# Altium footprint library AudioMoth 1.1.PCBLIB: 193 footprints (part 9 of 13)
Each footprint in its own frame and in the unit in brackets; x right, y up, seen from the top. Pads: shape width x height; smd on the part's side, far side on the other; paste and mask are expansions set on the pad; w line width, h text height; cw(c..) or ccw(c..) is an arc to the next point about the centre after c.
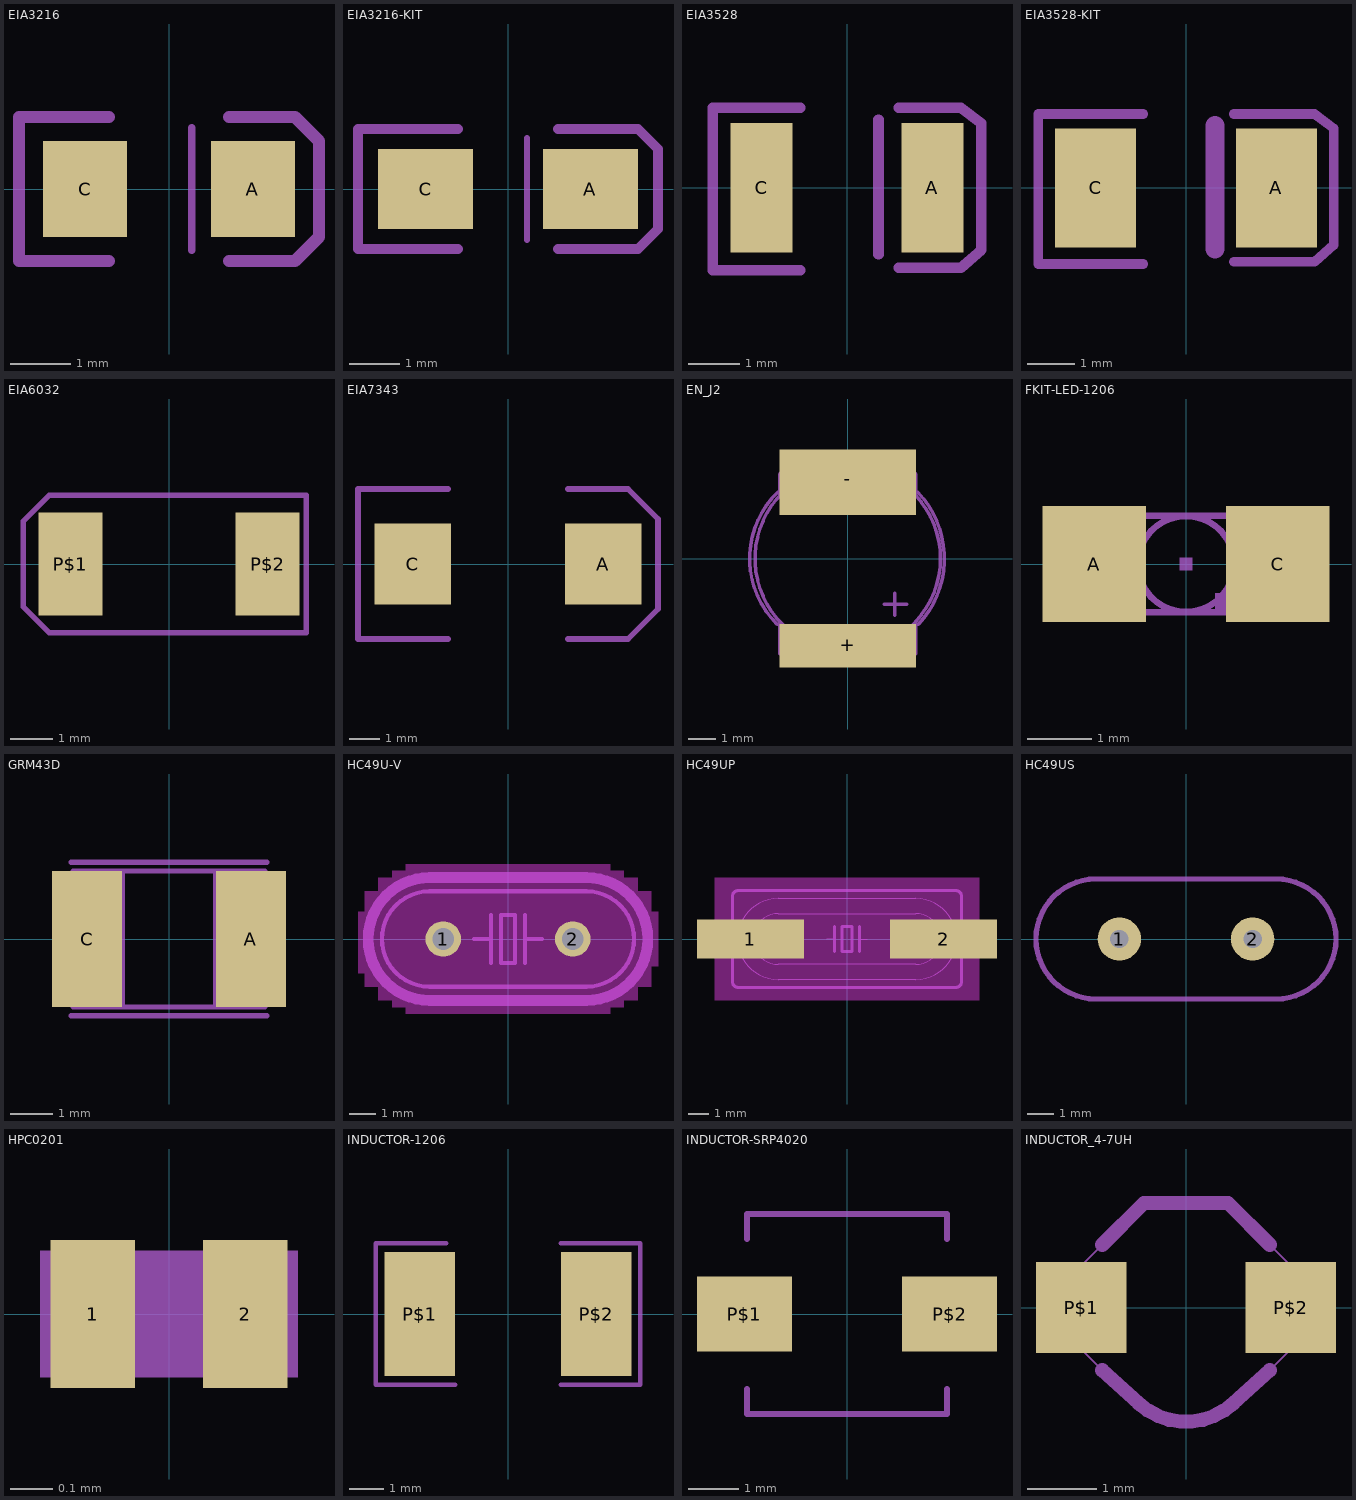
[diagram p8: the footprints below, top view; thin cyan lines are the x and y axes]

## EIA3216 [mm]
pads (2):
  rect 1.4x1.6 smd: A(1.4,0) C(-1.4,0)
tPlace:
  lines w0.127: 0.381,-1.016 0.381,1.016
  lines w0.203: -1,-1.2 -2.5,-1.2 -2.5,1.2 -1,1.2 ; 1,-1.2 2.1,-1.2 2.5,-0.8 2.5,0.8 2.1,1.2 1,1.2

## EIA3216-KIT [mm]
pads (2):
  rect 1.9x1.6 smd: A(1.65,0) C(-1.65,0)
tPlace:
  lines w0.127: 0.381,-1.016 0.381,1.016
  lines w0.203: -1,-1.2 -3,-1.2 -3,1.2 -1,1.2 ; 1,-1.2 2.6,-1.2 3,-0.8 3,0.8 2.6,1.2 1,1.2

## EIA3528 [mm]
pads (2):
  rect 1.2x2.5 smd: A(1.65,0) C(-1.65,0)
tPlace:
  lines w0.203: -0.9,-1.6 -2.6,-1.6 -2.6,1.55 -0.9,1.55 ; 0.609,-1.286 0.609,1.311 ; 1,-1.55 2.2,-1.55 2.6,-1.2 2.6,1.25 2.2,1.55 1,1.55

## EIA3528-KIT [mm]
pads (2):
  rect 1.7x2.5 smd: A(1.9,0) C(-1.9,0)
tPlace:
  lines w0.203: -0.9,-1.6 -3.1,-1.6 -3.1,1.55 -0.9,1.55 ; 1,-1.55 2.7,-1.55 3.1,-1.2 3.1,1.25 2.7,1.55 1,1.55
  lines w0.4: 0.609,-1.286 0.609,1.311

## EIA6032 [mm]
pads (2):
  rect 1.5x2.4 smd: P$1(-2.3,0) P$2(2.3,0)
tPlace:
  lines w0.127: -3.4,-1 -3.4,1 -2.8,1.6 3.2,1.6 3.2,-1.6 -2.8,-1.6 -3.4,-1

## EIA7343 [mm]
pads (2):
  rect 2.55x2.7 smd: A(3.17,0) C(-3.17,0)
tPlace:
  lines w0.203: -2,-2.5 -5,-2.5 -5,2.5 -2,2.5 ; 2,-2.5 4,-2.5 5,-1.5 5,1.5 4,2.5 2,2.5

## EN_J2 [mm]
pads (2):
  rect 5x1.6 smd: +(0,-3.2)
  rect 5x2.4 smd: -(0,2.8)
tDocu:
  circle w0.127: c0,0 r3.4
  lines w0.127: -2.5,-2.3 -2.5,-3.5 2.5,-3.5 2.5,-2.3 ; -2.5,2.3 -2.5,3.1 -2.1,3.5 2.1,3.5 2.5,3.1 2.5,2.3
tPlace:
  lines w0.127: -2.591,-2.413 cw(c-0.203,0) -2.565,2.438 ; 1.346,-1.676 2.159,-1.676 ; 1.727,-2.083 1.727,-1.27 ; 2.565,2.438 cw(c0.013,-0.001) 2.591,-2.413

## FKIT-LED-1206 [mm]
pads (2):
  rect 1.6x1.803 smd: A(-1.422,0) C(1.422,0)
tDocu:
  region: 0.45,-0.7 0.45,-0.45 0.8,-0.45 0.8,-0.7
  region: 0.8,-0.7 0.8,0.5 0.9,0.5 0.9,-0.7
  region: 0.8,0.55 0.8,0.7 0.9,0.7 0.9,0.55
  region: -0.9,-0.7 -0.9,0.5 -0.8,0.5 -0.8,-0.7
  region: -0.9,0.55 -0.9,0.7 -0.8,0.7 -0.8,0.55
  lines w0.102: -0.55,-0.5 cw(c0,0) -0.55,0.5 ; 0.55,-0.5 ccw(c0,0) 0.55,0.5 ; -1.55,-0.75 1.55,-0.75 1.55,0.75 -1.55,0.75 -1.55,-0.75
tPlace:
  region: -0.1,-0.1 -0.1,0.1 0.1,0.1 0.1,-0.1
  region: 0.45,-0.7 0.45,-0.45 0.6,-0.45 0.6,-0.7
  lines w0.102: -0.55,-0.5 ccw(c0,0) 0.55,-0.5 ; -0.55,0.5 cw(c0,0) 0.55,0.5

## GRM43D [mm]
pads (2):
  rect 1.65x3.2 smd: A(1.927,0) C(-1.927,0)
tDocu:
  region: -2.2,-1.6 -2.2,1.6 -1.1,1.6 -1.1,-1.6
  region: 1.1,-1.6 1.1,1.6 2.2,1.6 2.2,-1.6
  lines w0.127: -1.1,-1.6 -2.25,-1.6 -2.25,1.6 -1.1,1.6 ; -1.1,-1.6 1.1,-1.6 ; -1.1,-1.6 -1.1,1.6 ; -1.1,1.6 1.1,1.6 ; 1.1,-1.6 2.25,-1.6 2.25,1.6 1.1,1.6 ; 1.1,-1.6 1.1,1.6
tPlace:
  lines w0.127: -2.3,-1.8 2.3,-1.8 ; -2.3,1.8 2.3,1.8

## HC49U-V [mil]
pads (2):
  round 52 hole 32: 1(-95,0) 2(95,0)
Top keep-out:
  region: -150,-110 -150,110 150,110 150,-110
  region: -170,-100 -170,100 -150,100 -150,-100
  region: -190,-90 -190,90 -170,90 -170,-90
  region: -210,-70 -210,70 -190,70 -190,-70
  region: -220,-50 -220,40 -210,40 -210,-50
  region: 150,-100 150,100 170,100 170,-100
  region: 170,-90 170,90 190,90 190,-90
  region: 190,-70 190,70 210,70 210,-70
  region: 210,-40 210,40 220,40 220,-40
tPlace:
  lines w6: -50,0 -25,0 ; -25,-35 -25,0 ; -25,35 -25,0 ; 25,-35 25,0 ; 25,35 25,0 ; 50,0 25,0 ; -115,-70 115,-70 ccw(c115,0) 115,70 -115,70 ccw(c-115,0) -115,-70 ; -10,-35 10,-35 10,35 -10,35 -10,-35
  lines w16: -115,-90 115,-90 ccw(c115,0) 115,90 -115,90 ccw(c-115,0) -115,-90

## HC49UP [mil]
pads (2):
  rect 210x76 smd: 1(-190,0) 2(190,0)
Top keep-out:
  region: -260,-120 -260,120 260,120 260,-120
tDocu:
  lines w2: -201.15,-45 cw(c-135,0) -201.15,45 ; -156.8,-45 cw(c-135,0) -156.8,45 ; 156.8,-45 ccw(c135,0) 156.8,45 ; 201.15,-45 ccw(c135,0) 201.15,45
  lines w6: -225,-45 -225,-15 ; -225,45 -225,15 ; 225,-45 225,45 ; 225,-15 255,-15 255,15 225,15 ; -225,-15 -225,15 ; -225,-15 -255,-15 -255,15 -225,15
tPlace:
  lines w2: -201.15,-45 ccw(c-135,0) -135,-80 135,-80 ccw(c135,0) 201.14,-45 ; -201.15,45 cw(c-135,-0.01) -135,80 135,80 cw(c135,0) 201.15,45 ; -156.8,-45 ccw(c-135,0.01) -135,-50 135,-50 ccw(c135,0.01) 156.8,-45 ; -156.8,45 cw(c-135,-0.01) -135,50 135,50 cw(c135,-0.01) 156.8,45 ; -40,0 -25,0 ; 25,0 40,0
  lines w6: -225,-45 -225,-85 ccw(c-215,-85) -215,-95 215,-95 ccw(c215,-85) 225,-85 225,-45 ; -225,45 -225,85 cw(c-215,85) -215,95 215,95 cw(c215,85) 225,85 225,45 ; -25,-25 -25,0 -25,25 ; 25,-25 25,0 25,25 ; -10,-25 -10,25 10,25 10,-25 -10,-25

## HC49US [mil]
pads (2):
  round 65 hole 27.56: 1(-100,0) 2(100,0)
tPlace:
  lines w8: -135,-90 135,-90 ccw(c135,0) 135,90 -135,90 ccw(c-135,0) -135,-90

## HPC0201 [mm]
pads (2):
  rect 0.2x0.35 smd: 1(-0.18,0) 2(0.18,0)
tDocu:
  region: -0.305,-0.15 -0.305,0.15 0.305,0.15 0.305,-0.15

## INDUCTOR-1206 [mil]
pads (2):
  rect 80x140 smd: P$1(-100,0) P$2(100,0)
tPlace:
  lines w5: -70,80 -150,80 -150,-80 -60,-80 ; 60,-80 150,-80 150,80 60,80

## INDUCTOR-SRP4020 [mm]
pads (2):
  rect 1.9x1.5 smd: P$1(-2.05,0) P$2(2.05,0)
tPlace:
  lines w0.127: -2,-1.5 -2,-2 2,-2 2,-1.5 ; -2,1.5 -2,2 2,2 2,1.5

## INDUCTOR_4-7UH [mm]
pads (2):
  rect 1.3x1.3 smd: P$1(-1.5,0) P$2(1.5,0)
tDocu:
  lines w0.03: -1.5,-0.6 -0.707,-1.393 ccw(c0,-0.686) 0.707,-1.393 1.5,-0.6 1.5,0.6 0.6,1.5 -0.6,1.5 -1.5,0.6 -1.5,-0.6
tPlace:
  lines w0.203: -1.2,-0.9 -0.678,-1.374 ccw(c0,-0.639) 0.678,-1.374 1.2,-0.9 ; -1.2,0.9 -0.6,1.5 0.6,1.5 1.2,0.9